# EAGLE library part MA06-1 (library AudioMoth 1.1.0)
PIN HEADER
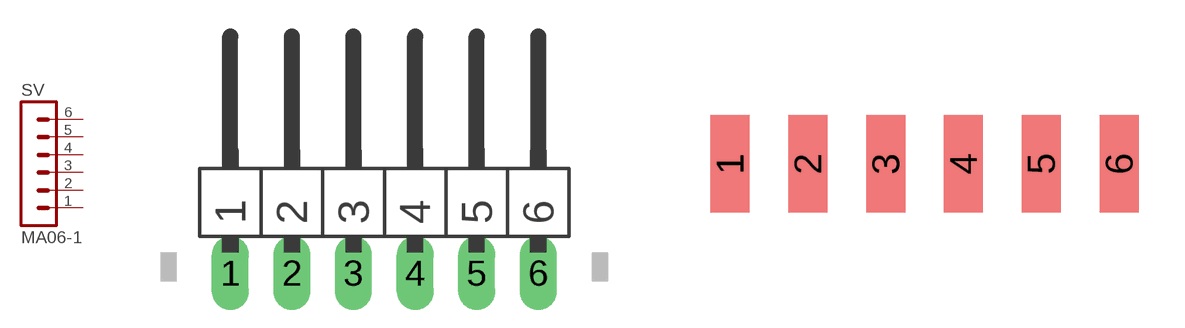
[diagram p3: symbol with the pads of MA06-1W; footprints MA06-1W, TSM-106-X-SH-BOARDEDGE]

Designator prefix SV

## MA06-1RIGHT_ANGLE  [MA06-1W]
1  1  pas
2  2  pas
3  3  pas
4  4  pas
5  5  pas
6  6  pas

## MA06-1SMD_BOARD_EDGE  [TSM-106-X-SH-BOARDEDGE]
Pads as for MA06-1W

## MA06-1SMD_RIGHT_ANGLE  [TSM-106-XX-XXX-SH]
Pads as for MA06-1W

## MA06-1STRAIGHT (OC_FARNELL: unknown; OC_NEWARK: unknown)  [MA06-1]
Pads as for MA06-1W

## Footprint MA06-1W (pad centres in mm)
PIN HEADER
drill 1.016 long: 1 -6.35,0; 2 -3.81,0; 3 -1.27,0; 4 1.27,0; 5 3.81,0; 6 6.35,0

## Footprint TSM-106-X-SH-BOARDEDGE (pad centres in mm)
smd 1.27 x 3.175: 1 -6.35,-1.473; 2 -3.81,-1.473; 3 -1.27,-1.473; 4 1.27,-1.473; 5 3.81,-1.473; 6 6.35,-1.473

## Footprint TSM-106-XX-XXX-SH (pad centres in mm)
.100" (2,54mm) Surface Mount, Single Row, Horizontal Mount.
smd 1.27 x 3.175: 1 -8.89,-6.553; 2 -6.35,-6.553; 3 -3.81,-6.553; 4 -1.27,-6.553; 5 1.27,-6.553; 6 3.81,-6.553

## Footprint MA06-1 (pad centres in mm)
PIN HEADER
drill 1.016 long: 1 -6.35,0; 2 -3.81,0; 3 -1.27,0; 4 1.27,0; 5 3.81,0; 6 6.35,0